# Altium schematic symbol library Thunderscope_Rev5.SCHLIB: 98 symbols
Pins are listed as number, name and electrical type; pins without a type are passive.

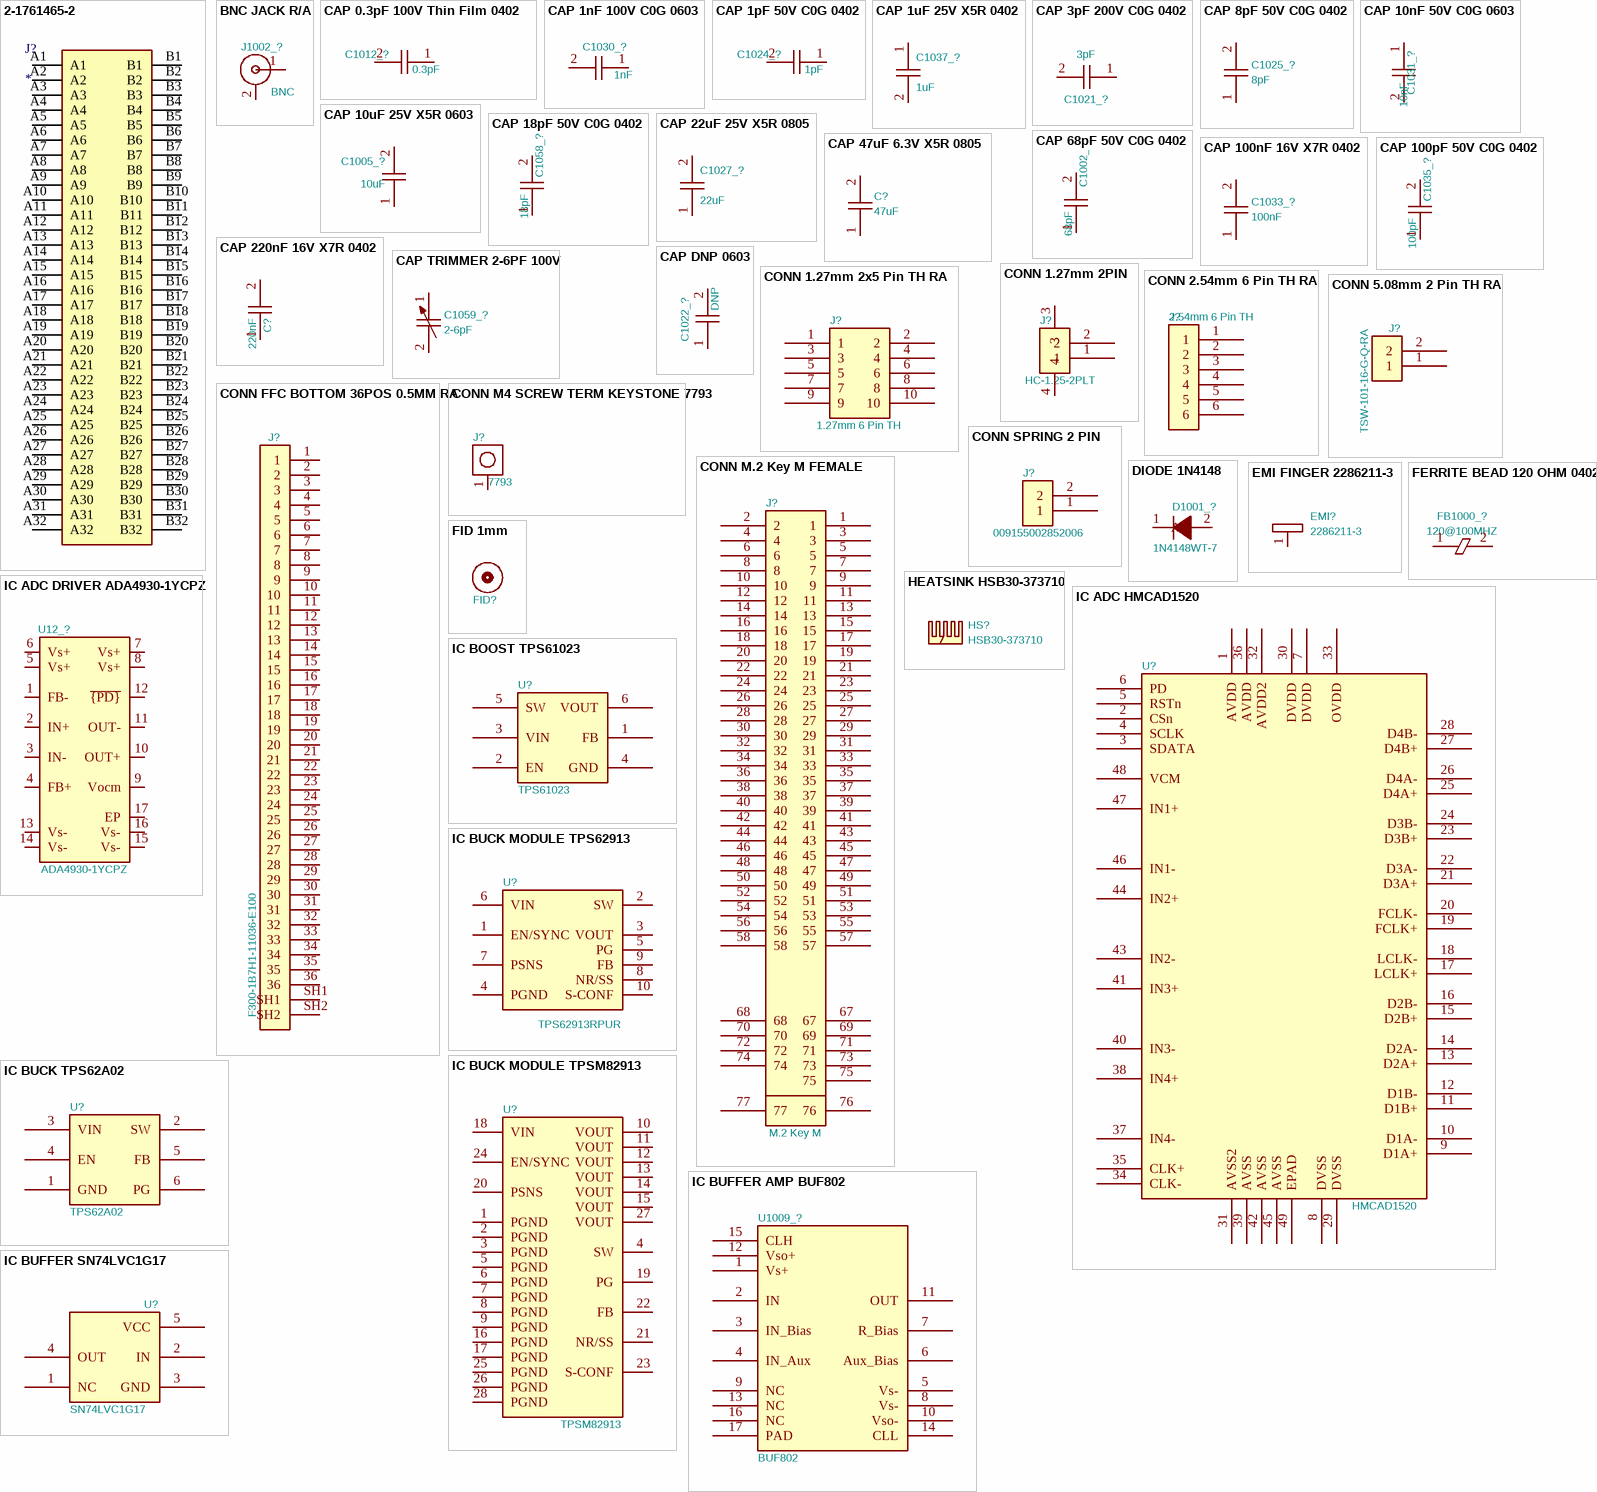
[diagram p0: symbols 2-1761465-2 to IC BUFFER SN74LVC1G17]

## 2-1761465-2
designator J?
Connector; Manufacturer_Name: TE Connectivity; Manufacturer_Part_Number: 2-1761465-2; Datasheet Link: https://www.mouser.com/datasheet/2/418/NG_CD_1761465_C-1243598.pdf; Height: 9.4mm; Mouser Part Number: 571-2-1761465-2; Mouser Price/Stock: https://www.mouser.co.uk/ProductDetail/TE-Connectivity/2-1761465-2?qs=sjGyaCEB9eZsZxkxHqzJRQ%3D%3D; Arrow Part Number: 2-1761465-2; Arrow Price/Stock: https://www.arrow.com/en/products/2-1761465-2/te-connectivity?region=nac
footprint 217614652
pins: A1, A2, A3, A4, A5, A6, A7, A8, A9, A10, A11, A12, A13, A14, A15, A16, A17, A18, A19, A20, A21, A22, A23, A24, A25, A26, A27, A28, A29, A30, A31, A32, B1, B2, B3, B4, B5, B6, B7, B8, B9, B10, B11, B12, B13, B14, B15, B16, B17, B18, B19, B20, B21, B22, B23, B24, B25, B26, B27, B28, B29, B30, B31, B32

## BNC JACK R/A
designator J1002_?, comment BNC
MANUFACTURER: Molex; MANUFACTURER PART NUMBER: 73100-0105; Substitutions Policy: No Substitutions; SUPPLIER 1: Mouser; SUPPLIER PART NUMBER 1: 538-73100-0105; PACKAGE: Through Hole; Footprint: Thunderscope_Rev5:MOL_0731000105; Value: BNC
footprint MOL_0731000105
pins: 1 Signal, 2 SHIELD

## CAP 0.3pF 100V Thin Film 0402
designator C1012_?, comment 0.3pF
MANUFACTURER: KYOCERA AVX; MANUFACTURER PART NUMBER: 04021J0R3ZBSTR; VOLTAGE RATING: 100V; Substitutions Policy: No Substitutions; PACKAGE: 0402; SUPPLIER 1: Mouser; SUPPLIER PART NUMBER 1: 581-04021J0R3ZBSTR; Footprint: Thunderscope_Rev5:GEN_C_0402; Value: 0.3pF
footprint GEN_C_0402
pins: 1, 2

## CAP 1nF 100V C0G 0603
designator C1030_?, comment 1nF
MANUFACTURER: Murata; MANUFACTURER PART NUMBER: GCM1885C2A102FA16D; VOLTAGE RATING: 100V; TEMPERATURE COEFFICIENT: C0G; Substitutions Policy: ECO Required for Substitution; PACKAGE: 0603; SUPPLIER 1: Mouser; SUPPLIER PART NUMBER 1: 81-GCM1885C2A102FA6D; Footprint: Thunderscope_Rev5:GEN_C_0603; Value: 1nF
footprint GEN_C_0603
pins: 1, 2

## CAP 1pF 50V C0G 0402
designator C1024_?, comment 1pF
MANUFACTURER: KEMET; MANUFACTURER PART NUMBER: CBR04C109A5GAC; VOLTAGE RATING: 50V; Substitutions Policy: No Substitutions; PACKAGE: 0402; SUPPLIER 1: Mouser; SUPPLIER PART NUMBER 1: 80-CBR04C109A5GAC; Footprint: Thunderscope_Rev5:GEN_C_0402; Value: 1pF
footprint GEN_C_0402
pins: 1, 2

## CAP 1uF 25V X5R 0402
designator C1037_?, comment 1uF
MANUFACTURER: Murata; MANUFACTURER PART NUMBER: GRM155R61E105KA12D; VOLTAGE RATING: 25V; Substitutions Policy: Any Parametric Equivalent; PACKAGE: 0402; SUPPLIER 1: Mouser; SUPPLIER PART NUMBER 1: 81-GRM155R61E105KA2D; Footprint: Thunderscope_Rev5:GEN_C_0402; Value: 1uF
footprint GEN_C_0402
pins: 1, 2

## CAP 3pF 200V C0G 0402
designator C1021_?, comment 3pF
MANUFACTURER: KEMET; MANUFACTURER PART NUMBER: CBR04C309B2GAC; VOLTAGE RATING: 200V; TEMPERATURE COEFFICIENT: C0G; Substitutions Policy: No Substitutions; PACKAGE: 0402; SUPPLIER 1: Mouser; SUPPLIER PART NUMBER 1: 80-CBR04C309B2GAC; Footprint: Thunderscope_Rev5:GEN_C_0402; Value: 3pF
footprint GEN_C_0402
pins: 1, 2

## CAP 8pF 50V C0G 0402
designator C1025_?, comment 8pF
MANUFACTURER: KEMET; MANUFACTURER PART NUMBER: CBR04C809B5GAC; VOLTAGE RATING: 50V; TEMPERATURE COEFFICIENT: C0G; Substitutions Policy: No Substitutions; PACKAGE: 0402; SUPPLIER 1: Mouser; SUPPLIER PART NUMBER 1: 80-CBR04C809B5GAC; Footprint: Thunderscope_Rev5:GEN_C_0402; Value: 8pF
footprint GEN_C_0402
pins: 1, 2

## CAP 10nF 50V C0G 0603
designator C1031_?, comment 10nF
MANUFACTURER: Murata; MANUFACTURER PART NUMBER: GRM1885C1H103JA01J; VOLTAGE RATING: 50V; Substitutions Policy: ECO Required for Substitution; PACKAGE: 0603; SUPPLIER 1: Mouser; SUPPLIER PART NUMBER 1: 81-GRM1885C1H103JA1J; Footprint: Thunderscope_Rev5:GEN_C_0603; Value: 10nF
footprint GEN_C_0603
pins: 1, 2

## CAP 10uF 25V X5R 0603
designator C1005_?, comment 10uF
MANUFACTURER: Murata; MANUFACTURER PART NUMBER: GRM188R61E106MA73D; VOLTAGE RATING: 25V; Substitutions Policy: Any Parametric Equivalent; PACKAGE: 0402; SUPPLIER 1: Mouser; SUPPLIER PART NUMBER 1: 81-GRM188R61E106MA3D; Footprint: Thunderscope_Rev5:GEN_C_0603; Value: 10uF
footprint GEN_C_0603
pins: 1, 2

## CAP 18pF 50V C0G 0402
designator C1058_?, comment 18pF
MANUFACTURER: KEMET; MANUFACTURER PART NUMBER: CBR04C180F5GAC; VOLTAGE RATING: 50V; TEMPERATURE COEFFICIENT: C0G; Substitutions Policy: No Substitutions; PACKAGE: 0402; SUPPLIER 1: Mouser; SUPPLIER PART NUMBER 1: 80-CBR04C180F5G; Footprint: Thunderscope_Rev5:GEN_C_0402; Value: 18pF
footprint GEN_C_0402
pins: 1, 2

## CAP 22uF 25V X5R 0805
designator C1027_?, comment 22uF
HOUSE PART NUMBER: C-22uF-0805-002; MANUFACTURER: Murata; MANUFACTURER PART NUMBER: GRM21BR61E226ME44L; VOLTAGE RATING: 25V; Substitutions Policy: Any Parametric Equivalent; PACKAGE: 0805; SUPPLIER 1: Mouser; SUPPLIER PART NUMBER 1: 81-GRM21BR61E226ME4L; Footprint: Thunderscope_Rev5:GEN_C_0805; Value: 22uF
footprint GEN_C_0805
pins: 1, 2

## CAP 47uF 6.3V X5R 0805
designator C?, comment 47uF
HOUSE PART NUMBER: C-47uF-0805-002; MANUFACTURER: Samsung; MANUFACTURER PART NUMBER: CL21A476MQYNNNE; VOLTAGE RATING: 6.3V; Substitutions Policy: Any Parametric Equivalent; PACKAGE: 0805; SUPPLIER 1: Mouser; SUPPLIER PART NUMBER 1: 187-CL32A226KPJNNNE; Footprint: Thunderscope_Rev5:GEN_C_0805; Value: 47uF
footprint GEN_C_0805
pins: 1, 2

## CAP 68pF 50V C0G 0402
designator C1002_?, comment 68pF
MANUFACTURER: Murata; MANUFACTURER PART NUMBER: GCM1555C1H680FA16J; TEMPERATURE COEFFICIENT: C0G; VOLTAGE RATING: 50V; Substitutions Policy: Any Parametric Equivalent; PACKAGE: 0402; SUPPLIER 1: Mouser; SUPPLIER PART NUMBER 1: 81-GCM1555C1H680FA6J; Footprint: Thunderscope_Rev5:GEN_C_0402; Value: 68pF
footprint GEN_C_0402
pins: 1, 2

## CAP 100nF 16V X7R 0402
designator C1033_?, comment 100nF
HOUSE PART NUMBER: C-100nF-0402-002; MANUFACTURER: Murata; MANUFACTURER PART NUMBER: GCM155R71C104KA55D; VOLTAGE RATING: 16V; Substitutions Policy: Any Parametric Equivalent; PACKAGE: 0402; SUPPLIER 1: Mouser; SUPPLIER PART NUMBER 1: 81-GCM155R71C104KA5D; Footprint: Thunderscope_Rev5:GEN_C_0402; Value: 100nF
footprint GEN_C_0402
pins: 1, 2

## CAP 100pF 50V C0G 0402
designator C1035_?, comment 100pF
MANUFACTURER: Murata; MANUFACTURER PART NUMBER: GCM1555C1H101FA16D; TEMPERATURE COEFFICIENT: C0G; VOLTAGE RATING: 50V; Substitutions Policy: Any Parametric Equivalent; PACKAGE: 0402; SUPPLIER 1: Mouser; SUPPLIER PART NUMBER 1: 81-GCM1555C1H101FA6D; Footprint: Thunderscope_Rev5:GEN_C_0402; Value: 100pF
footprint GEN_C_0402
pins: 1, 2

## CAP 220nF 16V X7R 0402
designator C?, comment 220nF
HOUSE PART NUMBER: C-100nF-0402-002; MANUFACTURER: Murata; MANUFACTURER PART NUMBER: GCM155R71C224KE02D; VOLTAGE RATING: 16V; Substitutions Policy: Any Parametric Equivalent; PACKAGE: 0402; SUPPLIER 1: Mouser; SUPPLIER PART NUMBER 1: 81-GCM155R71C224KE2D; Footprint: Thunderscope_Rev5:GEN_C_0402; Value: 220nF
footprint GEN_C_0402
pins: 1, 2

## CAP DNP 0603
designator C1022_?, comment DNP
PACKAGE: 0603; Footprint: Thunderscope_Rev5:GEN_C_0603; Value: DNP
footprint GEN_C_0603
pins: 1, 2

## CAP TRIMMER 2-6PF 100V
designator C1059_?, comment 2-6pF
MANUFACTURER: EW Electronics; MANUFACTURER PART NUMBER: SGC3S060; Substitutions Policy: ECO Required for Substitution; SUPPLIER 1: Digikey; SUPPLIER PART NUMBER 1: 2447-SGC3S060CT-ND; PACKAGE: 2-SMD (4.5x3.2mm); Footprint: Thunderscope_Rev5:EW_TRIMCAP; Value: 2-6pF
footprint EW_TRIMCAP
pins: 1, 2

## CONN 1.27mm 2PIN
designator J?, comment HC-1.25-2PLT
MANUFACTURER: KYOCERA AVX; MANUFACTURER PART NUMBER: 009155002852006; Substitutions Policy: No Substitutions; SUPPLIER 1: Mouser; SUPPLIER PART NUMBER 1: 581-009155002852006; PACKAGE: Surface Mount; Footprint: Thunderscope_Rev5:KYO_009155002852006; Value: HC-1.25-2PLT
footprint CONN-SMD_HC-1.25-2PLT
pins: 1, 2, 3, 4

## CONN 1.27mm 2x5 Pin TH RA
designator J?, comment 1.27mm 6 Pin TH
MANUFACTURER: CNC Tech; MANUFACTURER PART NUMBER: 3220-10-0200-00; Substitutions Policy: ECO Required for Substitution; SUPPLIER 1: Digi-Key; SUPPLIER PART NUMBER 1: 1175-1628-ND; PACKAGE: Through Hole; Footprint: Thunderscope_Rev5:GEN_1.27mm_2x5_Pin_TH_RA; Value: 1.27mm 6 Pin TH
footprint GEN_1.27mm_2x5_Pin_TH_RA
pins: 1, 2, 3, 4, 5, 6, 7, 8, 9, 10

## CONN 2.54mm 6 Pin TH RA
designator J?, comment 2.54mm 6 Pin TH
MANUFACTURER: Wurth Electronics; MANUFACTURER PART NUMBER: 61300611021; Substitutions Policy: ECO Required for Substitution; SUPPLIER 1: Mouser; SUPPLIER PART NUMBER 1: 710-61300611021; PACKAGE: Through Hole; Footprint: Thunderscope_Rev5:GEN_2.54MM_6_PIN_TH_RA; Value: 2.54mm 6 Pin TH
footprint GEN_2.54MM_6_PIN_TH_RA
pins: 1, 2, 3, 4, 5, 6

## CONN 5.08mm 2 Pin TH RA
designator J?, comment TSW-101-16-G-Q-RA
MANUFACTURER: Samtec; Substitutions Policy: ECO Required for Substitution; SUPPLIER 1: Mouser; SUPPLIER PART NUMBER 1: 200-TSW10116GQRA; MANUFACTURER PART NUMBER: TSW-101-16-G-Q-RA; PACKAGE: Through Hole; Footprint: Thunderscope_Rev5:GEN_5.08mm_1x2_Pin_TH_RA; Value: TSW-101-16-G-Q-RA
footprint GEN_5.08mm_1x2_Pin_TH_RA
pins: 1, 2

## CONN FFC BOTTOM 36POS 0.5MM RA
designator J?, comment F300-1B7H1-11036-E100
MANUFACTURER: Amphenol ICC; Substitutions Policy: No Substitutions; SUPPLIER 1: Mouser; SUPPLIER PART NUMBER 1: 649-F3001B7H111036E1; MANUFACTURER PART NUMBER: F300-1B7H1-11036-E100; PACKAGE: Surface Mount; Footprint: Thunderscope_Rev5:AMPHENOL_F300-1B7H1-11036-E100; Value: F300-1B7H1-11036-E100
footprint AMPHENOL_F300-1B7H1-11036-E100
pins: 1, 2, 3, 4, 5, 6, 7, 8, 9, 10, 11, 12, 13, 14, 15, 16, 17, 18, 19, 20, 21, 22, 23, 24, 25, 26, 27, 28, 29, 30, 31, 32, 33, 34, 35, 36, SH1, SH2

## CONN M4 SCREW TERM KEYSTONE 7793
designator J?, comment 7793
MANUFACTURER: Keystone Electronics; Substitutions Policy: No Substitutions; MANUFACTURER PART NUMBER: 7793; SUPPLIER 1: Mouser; SUPPLIER PART NUMBER 1: 534-7793; PACKAGE: Through Hole; Footprint: Thunderscope_Rev5:KEY_7792; Value: 7793
footprint KEY_7792
pins: 1

## CONN M.2 Key M FEMALE
designator J?, comment M.2 Key M
MANUFACTURER: TE Connectivity; MANUFACTURER PART NUMBER: 1-2199230-5; Substitutions Policy: No Substitutions; SUPPLIER 1: Mouser; SUPPLIER PART NUMBER 1: 571-1-2199230-5; PACKAGE: Surface Mount; Footprint: Thunderscope_Rev5:TE_M2_KEYM_2199230; Value: M.2 Key M
footprint TE_M2_KEYM_2199230
pins: 1, 2, 3, 4, 5, 6, 7, 8, 9, 10, 11, 12, 13, 14, 15, 16, 17, 18, 19, 20, 21, 22, 23, 24, 25, 26, 27, 28, 29, 30, 31, 32, 33, 34, 35, 36, 37, 38, 39, 40, 41, 42, 43, 44, 45, 46, 47, 48, 49, 50, 51, 52, 53, 54, 55, 56, 57, 58, 67, 68, 69, 70, 71, 72, 73, 74, 75, 76, 77

## CONN SPRING 2 PIN
designator J?, comment 009155002852006
MANUFACTURER: KYOCERA AVX; Substitutions Policy: No Substitutions; SUPPLIER 1: Mouser; SUPPLIER PART NUMBER 1: 581-009155002852006; MANUFACTURER PART NUMBER: 009155002852006; PACKAGE: Surface Mount; Footprint: Thunderscope_Rev5:KYO_009155002852006; Value: 009155002852006
footprint KYO_009155002852006
pins: 1, 2

## DIODE 1N4148
designator D1001_?, comment 1N4148WT-7
MANUFACTURER: Diodes; Substitutions Policy: ECO Required for Substitution; SUPPLIER 1: Mouser; SUPPLIER PART NUMBER 1: 621-1N4148WT; MANUFACTURER PART NUMBER: 1N4148WT-7; PACKAGE: SOD-523; Footprint: Thunderscope_Rev5:GEN_SOD_523; Value: 1N4148WT-7
footprint GEN_SOD_523
pins: 1 K, 2 A

## EMI FINGER 2286211-3
designator EMI?, comment 2286211-3
MANUFACTURER: TE Connectivity; Substitutions Policy: No Substitutions; SUPPLIER 1: Mouser; SUPPLIER PART NUMBER 1: 571-2286211-3; MANUFACTURER PART NUMBER: 2286211-3; PACKAGE: Surface Mount; Footprint: Thunderscope_Rev5:TE_2286211-3; Value: 2286211-3
footprint TE_2286211-3
pins: 1

## FERRITE BEAD 120 OHM 0402
designator FB1000_?, comment 120@100MHZ
HOUSE PART NUMBER: BLM15PX121SN1D; MANUFACTURER: Murata; Substitutions Policy: No Substitutions; SUPPLIER 1: Mouser; SUPPLIER PART NUMBER 1: 81-BLM15PX121SN1D; MANUFACTURER PART NUMBER: BLM15PX121SN1D; PACKAGE: 0402; Footprint: Thunderscope_Rev5:GEN_R_0402; Value: 120@100MHZ
footprint GEN_R_0402
pins: 1, 2

## FID 1mm
designator FID?, comment PCB  (value not drawn)
HOUSE PART NUMBER: Fiducial-1; Footprint: Thunderscope_Rev5:GEN_FID; Value: PCB
footprint GEN_FID

## HEATSINK HSB30-373710
designator HS?, comment HSB30-373710
MANUFACTURER: Same Sky; SUPPLIER 1: Mouser; SUPPLIER PART NUMBER 1: 179-HSB30-373710; MANUFACTURER PART NUMBER: HSB30-373710; Footprint: Thunderscope_Rev5:SSKY_HSB30-373710; Value: HSB30-373710
footprint SSKY_HSB30-373710

## IC ADC DRIVER ADA4930-1YCPZ
designator U12_?, comment ADA4930-1YCPZ
MANUFACTURER: Analog Devices; MANUFACTURER PART NUMBER: ADA4930-1YCPZ-R7; Substitutions Policy: No Substitutions; SUPPLIER 1: Mouser; SUPPLIER PART NUMBER 1: 584-ADA4930-1YCPZ-R7; PACKAGE: 16-QFN (3x3mm); Footprint: Thunderscope_Rev5:AD_QFN16_CP-16-21; Value: ADA4930-1YCPZ
footprint AD_QFN16_CP-16-21
pins: 1 FB-, 2 IN+, 3 IN-, 4 FB+, 5 Vs+, 6 Vs+, 7 Vs+, 8 Vs+, 9 Vocm, 10 OUT+, 11 OUT-, 12 ~{{PD}}, 13 Vs-, 14 Vs-, 15 Vs-, 16 Vs-, 17 EP

## IC ADC HMCAD1520
designator U?, comment HMCAD1520
MANUFACTURER: Analog Devices; Substitutions Policy: No Substitutions; SUPPLIER 1: Mouser; SUPPLIER PART NUMBER 1: 584-HMCAD1520; MANUFACTURER PART NUMBER: HMCAD1520; PACKAGE: 48-QFN (7x7mm); Footprint: Thunderscope_Rev5:AD_QFN48_LP7; Value: HMCAD1520
footprint AD_QFN48_LP7
pins: 1 AVDD, 2 CSn, 3 SDATA, 4 SCLK, 5 RSTn, 6 PD, 7 DVDD, 8 DVSS, 9 D1A+, 10 D1A-, 11 D1B+, 12 D1B-, 13 D2A+, 14 D2A-, 15 D2B+, 16 D2B-, 17 LCLK+, 18 LCLK-, 19 FCLK+, 20 FCLK-, 21 D3A+, 22 D3A-, 23 D3B+, 24 D3B-, 25 D4A+, 26 D4A-, 27 D4B+, 28 D4B-, 29 DVSS, 30 DVDD, 31 AVSS2, 32 AVDD2, 33 OVDD, 34 CLK-, 35 CLK+, 36 AVDD, 37 IN4-, 38 IN4+, 39 AVSS, 40 IN3-, 41 IN3+, 42 AVSS, 43 IN2-, 44 IN2+, 45 AVSS, 46 IN1-, 47 IN1+, 48 VCM, 49 EPAD

## IC BOOST TPS61023
designator U?, comment TPS61023
MANUFACTURER: Texas Instruments; MANUFACTURER PART NUMBER: TPS61023DRLT; Substitutions Policy: No Substitutions; SUPPLIER 1: Texas Instruments; SUPPLIER PART NUMBER 1: TPS61023DRLT; PACKAGE: SOT-563; Footprint: Thunderscope_Rev5:TI_SOT563_DRL0006A; Value: TPS61023
footprint TI_SOT563_DRL0006A
pins: 1 FB, 2 EN, 3 VIN, 4 GND, 5 SW, 6 VOUT

## IC BUCK MODULE TPS62913
designator U?, comment value TPS62913RPUR  (hidden comment: TPS62913)
MANUFACTURER: Texas Instruments; MANUFACTURER PART NUMBER: TPSM82913RDUR; Substitutions Policy: No Substitutions; SUPPLIER 1: Texas Instruments; SUPPLIER PART NUMBER 1: TPSM82913RDUR; PACKAGE: 28-B0QFN (4.5x5.5mm); Footprint: Thunderscope_Rev5:TI_B0QFN_RDU0028A
footprint TPS62913RPUR
pins: 1 EN/SYNC, 2 SW, 3 VOUT, 4 PGND, 5 PG, 6 VIN, 7 PSNS, 8 NR/SS, 9 FB, 10 S-CONF

## IC BUCK MODULE TPSM82913
designator U?, comment TPSM82913
MANUFACTURER: Texas Instruments; MANUFACTURER PART NUMBER: TPSM82913RDUR; Substitutions Policy: No Substitutions; SUPPLIER 1: Texas Instruments; SUPPLIER PART NUMBER 1: TPSM82913RDUR; PACKAGE: 28-B0QFN (4.5x5.5mm); Footprint: Thunderscope_Rev5:TI_B0QFN_RDU0028A; Value: TPSM82913
footprint TI_B0QFN_RDU0028A
pins: 1 PGND, 2 PGND, 3 PGND, 4 SW, 5 PGND, 6 PGND, 7 PGND, 8 PGND, 9 PGND, 10 VOUT, 11 VOUT, 12 VOUT, 13 VOUT, 14 VOUT, 15 VOUT, 16 PGND, 17 PGND, 18 VIN, 19 PG, 20 PSNS, 21 NR/SS, 22 FB, 23 S-CONF, 24 EN/SYNC, 25 PGND, 26 PGND, 27 VOUT, 28 PGND

## IC BUCK TPS62A02
designator U?, comment TPS62A02
HOUSE PART NUMBER: TPS62A02DRLR; MANUFACTURER: Texas Instruments; Substitutions Policy: No Substitutions; SUPPLIER 1: Texas Instruments; SUPPLIER PART NUMBER 1: TPS62A02DRLR; MANUFACTURER PART NUMBER: TPS62A02DRLR; PACKAGE: SOT-563; Footprint: Thunderscope_Rev5:TI_SOT563_DRL0006A; Value: TPS62A02
footprint TI_SOT563_DRL0006A
pins: 1 GND, 2 SW, 3 VIN, 4 EN, 5 FB, 6 PG

## IC BUFFER AMP BUF802
designator U1009_?, comment BUF802
MANUFACTURER: Texas Instruments; MANUFACTURER PART NUMBER: BUF802IRGTR; Substitutions Policy: No Substitutions; SUPPLIER 1: Texas Instruments; SUPPLIER PART NUMBER 1: BUF802IRGTR; PACKAGE: 16-VQFN (3x3mm); Footprint: Thunderscope_Rev5:TI_VQFN_RGT0016C; Value: BUF802
footprint TI_VQFN_RGT0016C
pins: 1 Vs+, 2 IN, 3 IN_Bias, 4 IN_Aux, 5 Vs-, 6 Aux_Bias, 7 R_Bias, 8 Vs-, 9 NC, 10 Vso-, 11 OUT, 12 Vso+, 13 NC, 14 CLL, 15 CLH, 16 NC, 17 PAD

## IC BUFFER SN74LVC1G17
designator U?, comment SN74LVC1G17
MANUFACTURER: Texas Instruments; MANUFACTURER PART NUMBER: SN74LVC1G17DCKR; Substitutions Policy: ECO Required for Substitution; SUPPLIER 1: Texas Instruments; SUPPLIER PART NUMBER 1: SN74LVC1G17DCKR; PACKAGE: SC-70-5; Footprint: Thunderscope_Rev5:GEN_SC-70-5; Value: SN74LVC1G17
footprint GEN_SC-70-5
pins: 1 NC, 2 IN, 3 GND, 4 OUT, 5 VCC

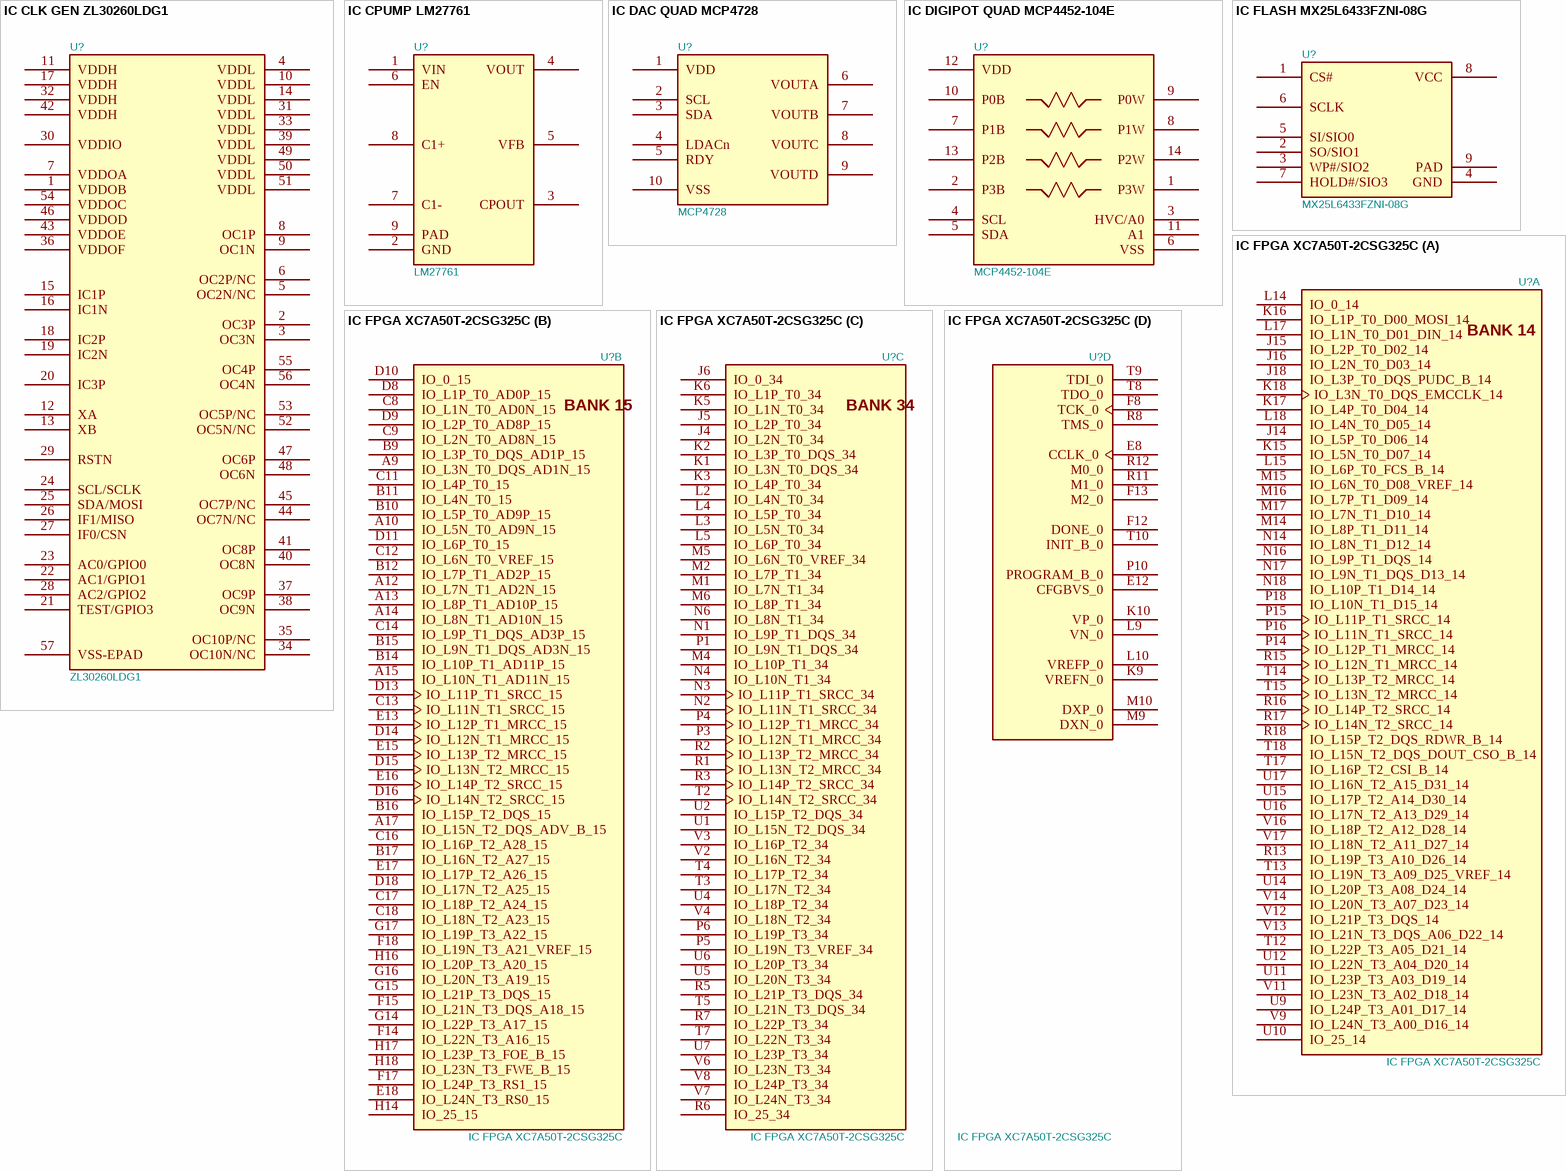
[diagram p1: symbols IC CLK GEN ZL30260LDG1 to IC FPGA XC7A50T-2CSG325C]

## IC CLK GEN ZL30260LDG1
designator U?, comment ZL30260LDG1
MANUFACTURER: Microchip; Substitutions Policy: No Substitutions; MANUFACTURER PART NUMBER: ZL30260LDG1; SUPPLIER 1: Mouser; SUPPLIER PART NUMBER 1: 494-ZL30260LDG1; PACKAGE: 56-VFQFN (8x8mm); Footprint: Thunderscope_Rev5:MC_QFN56_ZL30260; Value: ZL30260LDG1
footprint MC_QFN56_ZL30260
pins: 1 VDDOB, 2 OC3P, 3 OC3N, 4 VDDL, 5 OC2N/NC, 6 OC2P/NC, 7 VDDOA, 8 OC1P, 9 OC1N, 10 VDDL, 11 VDDH, 12 XA, 13 XB, 14 VDDL, 15 IC1P, 16 IC1N, 17 VDDH, 18 IC2P, 19 IC2N, 20 IC3P, 21 TEST/GPIO3, 22 AC1/GPIO1, 23 AC0/GPIO0, 24 SCL/SCLK, 25 SDA/MOSI, 26 IF1/MISO, 27 IF0/CSN, 28 AC2/GPIO2, 29 RSTN, 30 VDDIO, 31 VDDL, 32 VDDH, 33 VDDL, 34 OC10N/NC, 35 OC10P/NC, 36 VDDOF, 37 OC9P, 38 OC9N, 39 VDDL, 40 OC8N, 41 OC8P, 42 VDDH, 43 VDDOE, 44 OC7N/NC, 45 OC7P/NC, 46 VDDOD, 47 OC6P, 48 OC6N, 49 VDDL, 50 VDDL, 51 VDDL, 52 OC5N/NC, 53 OC5P/NC, 54 VDDOC, 55 OC4P, 56 OC4N, 57 VSS-EPAD

## IC CPUMP LM27761
designator U?, comment LM27761
MANUFACTURER: Texas Instruments; MANUFACTURER PART NUMBER: LM27761DSGR; Substitutions Policy: No Substitutions; SUPPLIER 1: Texas Instruments; SUPPLIER PART NUMBER 1: LM27761DSGR; PACKAGE: 8-WFDFN (2x2mm); Footprint: Thunderscope_Rev5:TI_WSON8_DSG0008A; Value: LM27761
footprint TI_WSON8_DSG0008A
pins: 1 VIN, 2 GND, 3 CPOUT, 4 VOUT, 5 VFB, 6 EN, 7 C1-, 8 C1+, 9 PAD

## IC DAC QUAD MCP4728
designator U?, comment MCP4728
MANUFACTURER: Microchip; MANUFACTURER PART NUMBER: MCP4728T-E/UN; Substitutions Policy: ECO Required for Substitution; SUPPLIER 1: Mouser; SUPPLIER PART NUMBER 1: 579-MCP4728T-E/UN; PACKAGE: 10-MSOP; Footprint: Thunderscope_Rev5:MC_MSOP10_UN; Value: MCP4728
footprint MC_MSOP10_UN
pins: 1 VDD, 2 SCL, 3 SDA, 4 LDACn, 5 RDY, 6 VOUTA, 7 VOUTB, 8 VOUTC, 9 VOUTD, 10 VSS

## IC DIGIPOT QUAD MCP4452-104E
designator U?, comment MCP4452-104E
MANUFACTURER: Microchip; Substitutions Policy: ECO Required for Substitution; SUPPLIER 1: Mouser; SUPPLIER PART NUMBER 1: 579-MCP4452-104E/ST; MANUFACTURER PART NUMBER: MCP4452-104E; PACKAGE: 14-TSSOP; Footprint: Thunderscope_Rev5:MC_TSSOP14; Value: MCP4452-104E
footprint MC_TSSOP14
pins: 1 P3W, 2 P3B, 3 HVC/A0, 4 SCL, 5 SDA, 6 VSS, 7 P1B, 8 P1W, 9 P0W, 10 P0B, 11 A1, 12 VDD, 13 P2B, 14 P2W

## IC FLASH MX25L6433FZNI-08G
designator U?, comment MX25L6433FZNI-08G
HOUSE PART NUMBER: MX25L6433FZNI-08G-TR; MANUFACTURER: Macronix; Substitutions Policy: ECO Required for Substitution; SUPPLIER 1: Mouser; SUPPLIER PART NUMBER 1: 95-25L6433FZNI08TR; MANUFACTURER PART NUMBER: MX25L6433FZNI-08G-TR; PACKAGE: 8-WSON (6x5mm); Footprint: Thunderscope_Rev5:MX_WSON8; Value: MX25L6433FZNI-08G
footprint MX_WSON8
pins: 1 CS#, 2 SO/SIO1, 3 WP#/SIO2, 4 GND, 5 SI/SIO0, 6 SCLK, 7 HOLD#/SIO3, 8 VCC, 9 PAD

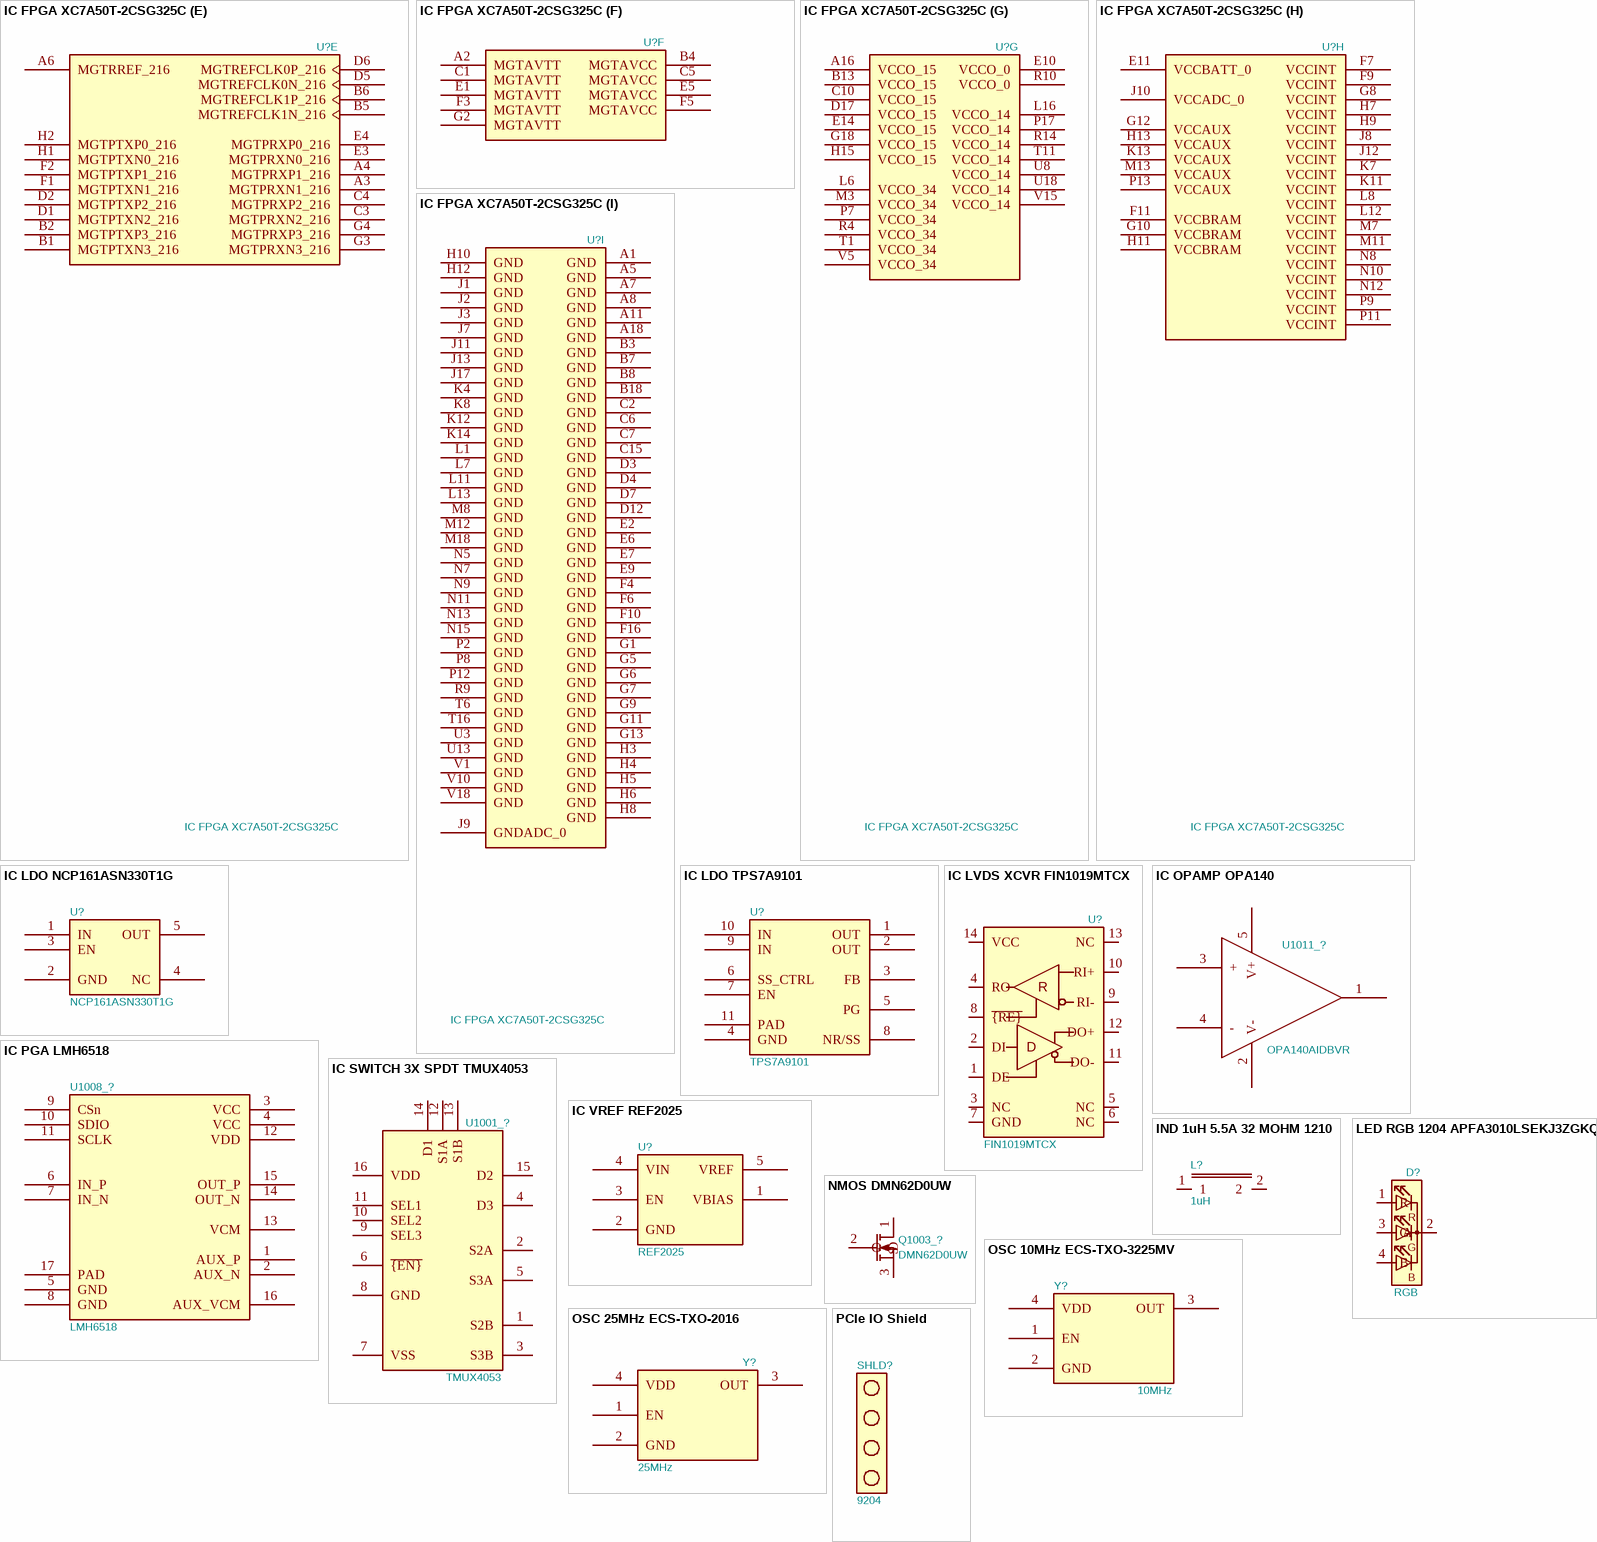
[diagram p2: symbols IC FPGA XC7A50T-2CSG325C to PCIe IO Shield]

## IC FPGA XC7A50T-2CSG325C
designator U?
MANUFACTURER: Xilinx; Substitutions Policy: No Substitutions; HOUSE PART NUMBER: XC7A50T-2CSG325C; MANUFACTURER PART NUMBER: XC7A50T-2CSG325C; SUPPLIER 1: Digi-Key; SUPPLIER PART NUMBER 1: 122-2193-ND; PACKAGE: 324-BGA (15x15mm); Footprint: Thunderscope_Rev5:XILINX_XC7A50T-2CSG325C; Value: IC FPGA XC7A50T-2CSG325C
footprint XILINX_XC7A50T-2CSG325C
part A pins: J14 IO_L5P_T0_D06_14, J15 IO_L2P_T0_D02_14, J16 IO_L2N_T0_D03_14, J18 IO_L3P_T0_DQS_PUDC_B_14, K15 IO_L5N_T0_D07_14, K16 IO_L1P_T0_D00_MOSI_14, K17 IO_L4P_T0_D04_14, K18 IO_L3N_T0_DQS_EMCCLK_14, L14 IO_0_14, L15 IO_L6P_T0_FCS_B_14, L17 IO_L1N_T0_D01_DIN_14, L18 IO_L4N_T0_D05_14, M14 IO_L8P_T1_D11_14, M15 IO_L6N_T0_D08_VREF_14, M16 IO_L7P_T1_D09_14, M17 IO_L7N_T1_D10_14, N14 IO_L8N_T1_D12_14, N16 IO_L9P_T1_DQS_14, N17 IO_L9N_T1_DQS_D13_14, N18 IO_L10P_T1_D14_14, P14 IO_L12P_T1_MRCC_14, P15 IO_L11P_T1_SRCC_14, P16 IO_L11N_T1_SRCC_14, P18 IO_L10N_T1_D15_14, R13 IO_L19P_T3_A10_D26_14, R15 IO_L12N_T1_MRCC_14, R16 IO_L14P_T2_SRCC_14, R17 IO_L14N_T2_SRCC_14, R18 IO_L15P_T2_DQS_RDWR_B_14, T12 IO_L22P_T3_A05_D21_14, T13 IO_L19N_T3_A09_D25_VREF_14, T14 IO_L13P_T2_MRCC_14, T15 IO_L13N_T2_MRCC_14, T17 IO_L16P_T2_CSI_B_14, T18 IO_L15N_T2_DQS_DOUT_CSO_B_14, U9 IO_L24P_T3_A01_D17_14, U10 IO_25_14, U11 IO_L23P_T3_A03_D19_14, U12 IO_L22N_T3_A04_D20_14, U14 IO_L20P_T3_A08_D24_14, U15 IO_L17P_T2_A14_D30_14, U16 IO_L17N_T2_A13_D29_14, U17 IO_L16N_T2_A15_D31_14, V9 IO_L24N_T3_A00_D16_14, V11 IO_L23N_T3_A02_D18_14, V12 IO_L21P_T3_DQS_14, V13 IO_L21N_T3_DQS_A06_D22_14, V14 IO_L20N_T3_A07_D23_14, V16 IO_L18P_T2_A12_D28_14, V17 IO_L18N_T2_A11_D27_14
part B pins: A9 IO_L3N_T0_DQS_AD1N_15, A10 IO_L5N_T0_AD9N_15, A12 IO_L7N_T1_AD2N_15, A13 IO_L8P_T1_AD10P_15, A14 IO_L8N_T1_AD10N_15, A15 IO_L10N_T1_AD11N_15, A17 IO_L15N_T2_DQS_ADV_B_15, B9 IO_L3P_T0_DQS_AD1P_15, B10 IO_L5P_T0_AD9P_15, B11 IO_L4N_T0_15, B12 IO_L7P_T1_AD2P_15, B14 IO_L10P_T1_AD11P_15, B15 IO_L9N_T1_DQS_AD3N_15, B16 IO_L15P_T2_DQS_15, B17 IO_L16N_T2_A27_15, C8 IO_L1N_T0_AD0N_15, C9 IO_L2N_T0_AD8N_15, C11 IO_L4P_T0_15, C12 IO_L6N_T0_VREF_15, C13 IO_L11N_T1_SRCC_15, C14 IO_L9P_T1_DQS_AD3P_15, C16 IO_L16P_T2_A28_15, C17 IO_L18P_T2_A24_15, C18 IO_L18N_T2_A23_15, D8 IO_L1P_T0_AD0P_15, D9 IO_L2P_T0_AD8P_15, D10 IO_0_15, D11 IO_L6P_T0_15, D13 IO_L11P_T1_SRCC_15, D14 IO_L12N_T1_MRCC_15, D15 IO_L13N_T2_MRCC_15, D16 IO_L14N_T2_SRCC_15, D18 IO_L17N_T2_A25_15, E13 IO_L12P_T1_MRCC_15, E15 IO_L13P_T2_MRCC_15, E16 IO_L14P_T2_SRCC_15, E17 IO_L17P_T2_A26_15, E18 IO_L24N_T3_RS0_15, F14 IO_L22N_T3_A16_15, F15 IO_L21N_T3_DQS_A18_15, F17 IO_L24P_T3_RS1_15, F18 IO_L19N_T3_A21_VREF_15, G14 IO_L22P_T3_A17_15, G15 IO_L21P_T3_DQS_15, G16 IO_L20N_T3_A19_15, G17 IO_L19P_T3_A22_15, H14 IO_25_15, H16 IO_L20P_T3_A20_15, H17 IO_L23P_T3_FOE_B_15, H18 IO_L23N_T3_FWE_B_15
part C pins: J4 IO_L2N_T0_34, J5 IO_L2P_T0_34, J6 IO_0_34, K1 IO_L3N_T0_DQS_34, K2 IO_L3P_T0_DQS_34, K3 IO_L4P_T0_34, K5 IO_L1N_T0_34, K6 IO_L1P_T0_34, L2 IO_L4N_T0_34, L3 IO_L5N_T0_34, L4 IO_L5P_T0_34, L5 IO_L6P_T0_34, M1 IO_L7N_T1_34, M2 IO_L7P_T1_34, M4 IO_L10P_T1_34, M5 IO_L6N_T0_VREF_34, M6 IO_L8P_T1_34, N1 IO_L9P_T1_DQS_34, N2 IO_L11N_T1_SRCC_34, N3 IO_L11P_T1_SRCC_34, N4 IO_L10N_T1_34, N6 IO_L8N_T1_34, P1 IO_L9N_T1_DQS_34, P3 IO_L12N_T1_MRCC_34, P4 IO_L12P_T1_MRCC_34, P5 IO_L19N_T3_VREF_34, P6 IO_L19P_T3_34, R1 IO_L13N_T2_MRCC_34, R2 IO_L13P_T2_MRCC_34, R3 IO_L14P_T2_SRCC_34, R5 IO_L21P_T3_DQS_34, R6 IO_25_34, R7 IO_L22P_T3_34, T2 IO_L14N_T2_SRCC_34, T3 IO_L17N_T2_34, T4 IO_L17P_T2_34, T5 IO_L21N_T3_DQS_34, T7 IO_L22N_T3_34, U1 IO_L15N_T2_DQS_34, U2 IO_L15P_T2_DQS_34, U4 IO_L18P_T2_34, U5 IO_L20N_T3_34, U6 IO_L20P_T3_34, U7 IO_L23P_T3_34, V2 IO_L16N_T2_34, V3 IO_L16P_T2_34, V4 IO_L18N_T2_34, V6 IO_L23N_T3_34, V7 IO_L24N_T3_34, V8 IO_L24P_T3_34
part D pins: E8 CCLK_0, E12 CFGBVS_0, F8 TCK_0, F12 DONE_0, F13 M2_0, K9 VREFN_0, K10 VP_0, L9 VN_0, L10 VREFP_0, M9 DXN_0, M10 DXP_0, P10 PROGRAM_B_0, R8 TMS_0, R11 M1_0, R12 M0_0, T8 TDO_0, T9 TDI_0, T10 INIT_B_0
part E pins: A3 MGTPRXN1_216, A4 MGTPRXP1_216, A6 MGTRREF_216, B1 MGTPTXN3_216, B2 MGTPTXP3_216, B5 MGTREFCLK1N_216, B6 MGTREFCLK1P_216, C3 MGTPRXN2_216, C4 MGTPRXP2_216, D1 MGTPTXN2_216, D2 MGTPTXP2_216, D5 MGTREFCLK0N_216, D6 MGTREFCLK0P_216, E3 MGTPRXN0_216, E4 MGTPRXP0_216, F1 MGTPTXN1_216, F2 MGTPTXP1_216, G3 MGTPRXN3_216, G4 MGTPRXP3_216, H1 MGTPTXN0_216, H2 MGTPTXP0_216
part F pins: A2 MGTAVTT, B4 MGTAVCC, C1 MGTAVTT, C5 MGTAVCC, E1 MGTAVTT, E5 MGTAVCC, F3 MGTAVTT, F5 MGTAVCC, G2 MGTAVTT
part G pins: A16 VCCO_15, B13 VCCO_15, C10 VCCO_15, D17 VCCO_15, E10 VCCO_0, E14 VCCO_15, G18 VCCO_15, H15 VCCO_15, L6 VCCO_34, L16 VCCO_14, M3 VCCO_34, P7 VCCO_34, P17 VCCO_14, R4 VCCO_34, R10 VCCO_0, R14 VCCO_14, T1 VCCO_34, T11 VCCO_14, U8 VCCO_14, U18 VCCO_14, V5 VCCO_34, V15 VCCO_14
part H pins: E11 VCCBATT_0, F7 VCCINT, F9 VCCINT, F11 VCCBRAM, G8 VCCINT, G10 VCCBRAM, G12 VCCAUX, H7 VCCINT, H9 VCCINT, H11 VCCBRAM, H13 VCCAUX, J8 VCCINT, J10 VCCADC_0, J12 VCCINT, K7 VCCINT, K11 VCCINT, K13 VCCAUX, L8 VCCINT, L12 VCCINT, M7 VCCINT, M11 VCCINT, M13 VCCAUX, N8 VCCINT, N10 VCCINT, N12 VCCINT, P9 VCCINT, P11 VCCINT, P13 VCCAUX
part I pins: A1 GND, A5 GND, A7 GND, A8 GND, A11 GND, A18 GND, B3 GND, B7 GND, B8 GND, B18 GND, C2 GND, C6 GND, C7 GND, C15 GND, D3 GND, D4 GND, D7 GND, D12 GND, E2 GND, E6 GND, E7 GND, E9 GND, F4 GND, F6 GND, F10 GND, F16 GND, G1 GND, G5 GND, G6 GND, G7 GND, G9 GND, G11 GND, G13 GND, H3 GND, H4 GND, H5 GND, H6 GND, H8 GND, H10 GND, H12 GND, J1 GND, J2 GND, J3 GND, J7 GND, J9 GNDADC_0, J11 GND, J13 GND, J17 GND, K4 GND, K8 GND, K12 GND, K14 GND, L1 GND, L7 GND, L11 GND, L13 GND, M8 GND, M12 GND, M18 GND, N5 GND, N7 GND, N9 GND, N11 GND, N13 GND, N15 GND, P2 GND, P8 GND, P12 GND, R9 GND, T6 GND, T16 GND, U3 GND, U13 GND, V1 GND, V10 GND, V18 GND
part A text: BANK 14
part B text: BANK 15
part C text: BANK 34

## IC LDO NCP161ASN330T1G
designator U?, comment NCP161ASN330T1G
MANUFACTURER: onsemi; Substitutions Policy: No Substitutions; MANUFACTURER PART NUMBER: NCP161ASN330T1G; SUPPLIER 1: Mouser; SUPPLIER PART NUMBER 1: 863-NCP161ASN330T1G; PACKAGE: SOT-23-5; Footprint: Thunderscope_Rev5:GEN_SOT23_5_950_2900X1600X1450; Value: NCP161ASN330T1G
footprint GEN_SOT23_5_950_2900X1600X1450
pins: 1 IN, 2 GND, 3 EN, 4 NC, 5 OUT

## IC LDO TPS7A9101
designator U?, comment TPS7A9101
MANUFACTURER: Texas Instruments; MANUFACTURER PART NUMBER: TPS7A9101DSKR; Substitutions Policy: No Substitutions; SUPPLIER 1: Texas Instruments; SUPPLIER PART NUMBER 1: TPS7A9101DSKR; PACKAGE: 10-DFN (2.5x2.5mm); Footprint: Thunderscope_Rev5:TI_WSON10_DSK0010A; Value: TPS7A9101
footprint TI_WSON10_DSK0010A
pins: 1 OUT, 2 OUT, 3 FB, 4 GND, 5 PG, 6 SS_CTRL, 7 EN, 8 NR/SS, 9 IN, 10 IN, 11 PAD

## IC LVDS XCVR FIN1019MTCX
designator U?, comment FIN1019MTCX
MANUFACTURER: onsemi; Substitutions Policy: No Substitutions; SUPPLIER 1: Mouser; SUPPLIER PART NUMBER 1: 512-FIN1019MTCX; MANUFACTURER PART NUMBER: FIN1019MTCX; PACKAGE: 14-TSSOP; Footprint: Thunderscope_Rev5:GEN_TSSOP-14_4.4x5mm_P0.65mm; Value: FIN1019MTCX
footprint GEN_TSSOP-14_4.4x5mm_P0.65mm
pins: 1 DE, 2 DI, 3 NC, 4 RO, 5 NC, 6 NC, 7 GND, 8 ~{{RE}}, 9 RI-, 10 RI+, 11 DO-, 12 DO+, 13 NC, 14 VCC
text: R; D

## IC OPAMP OPA140
designator U1011_?, comment OPA140AIDBVR
MANUFACTURER: Texas Instruments; Substitutions Policy: No Substitutions; SUPPLIER 1: Texas Instruments; SUPPLIER PART NUMBER 1: OPA140AIDBVR; MANUFACTURER PART NUMBER: OPA140AIDBVR; PACKAGE: SOT-23-5; Footprint: Thunderscope_Rev5:GEN_SOT23_5_950_2900X1600X1450; Value: OPA140AIDBVR
footprint GEN_SOT23_5_950_2900X1600X1450
pins: 1 OUT, 2 V-, 3 +, 4 -, 5 V+

## IC PGA LMH6518
designator U1008_?, comment LMH6518
MANUFACTURER: Texas Instruments; MANUFACTURER PART NUMBER: LMH6518SQX/NOPB; Substitutions Policy: No Substitutions; SUPPLIER 1: Texas Instruments; SUPPLIER PART NUMBER 1: LMH6518SQX/NOPB; PACKAGE: 16-WQFN (4x4mm); Footprint: Thunderscope_Rev5:TI_WQFN_RGH0016A; Value: LMH6518
footprint TI_WQFN_RGH0016A
pins: 1 AUX_P, 2 AUX_N, 3 VCC, 4 VCC, 5 GND, 6 IN_P, 7 IN_N, 8 GND, 9 CSn, 10 SDIO, 11 SCLK, 12 VDD, 13 VCM, 14 OUT_N, 15 OUT_P, 16 AUX_VCM, 17 PAD

## IC SWITCH 3X SPDT TMUX4053
designator U1001_?, comment TMUX4053
MANUFACTURER: Texas Instruments; MANUFACTURER PART NUMBER: TMUX4053DYYR; Substitutions Policy: No Substitutions; SUPPLIER 1: Texas Instruments; SUPPLIER PART NUMBER 1: TMUX4053DYYR; PACKAGE: 16-SOT-23-THIN; Footprint: Thunderscope_Rev5:TI_TSOT-23-16_DYY0016A; Value: TMUX4053
footprint TI_TSOT-23-16_DYY0016A
pins: 1 S2B, 2 S2A, 3 S3B, 4 D3, 5 S3A, 6 ~{{EN}}, 7 VSS, 8 GND, 9 SEL3, 10 SEL2, 11 SEL1, 12 S1A, 13 S1B, 14 D1, 15 D2, 16 VDD

## IC VREF REF2025
designator U?, comment REF2025
MANUFACTURER: Texas Instruments; MANUFACTURER PART NUMBER: REF2025AIDDCR; Substitutions Policy: No Substitutions; SUPPLIER 1: Texas Instruments; SUPPLIER PART NUMBER 1: REF2025AIDDCR; PACKAGE: SOT-23-5; Footprint: Thunderscope_Rev5:GEN_SOT23_5_950_2900X1600X1450; Value: REF2025
footprint GEN_SOT23_5_950_2900X1600X1450
pins: 1 VBIAS, 2 GND, 3 EN, 4 VIN, 5 VREF

## IND 1uH 5.5A 32 MOHM 1210
designator L?, comment 1uH
HOUSE PART NUMBER: SRP3212-1R0M; MANUFACTURER: Bourns; Substitutions Policy: ECO Required for Substitution; SUPPLIER 1: Mouser; SUPPLIER PART NUMBER 1: 652-SRP3212-1R0M; MANUFACTURER PART NUMBER: SRP3212-1R0M; PACKAGE: 1210; Footprint: Thunderscope_Rev5:GEN_L_1210; Value: 1uH
footprint GEN_L_1210
pins: 1, 2

## LED RGB 1204 APFA3010LSEKJ3ZGKQBC
designator D?, comment RGB
MANUFACTURER: Kingbright; MANUFACTURER PART NUMBER: APFA3010LSEKJ3ZGKQBC; Substitutions Policy: ECO Required for Substitution; SUPPLIER 1: Mouser; SUPPLIER PART NUMBER 1: 604-APFA3010LSEKJ3ZG; PACKAGE: 4-SMD; Footprint: Thunderscope_Rev5:LED_Kingbright_APFA3010_3x1.5mm_Horizontal; Value: RGB
footprint LED_Kingbright_APFA3010_3x1.5mm_Horizontal
pins: 1 R, 2 A, 3 G, 4 B

## NMOS DMN62D0UW
designator Q1003_?, comment DMN62D0UW
HOUSE PART NUMBER: DMN62D0UW-7; MANUFACTURER: Diodes; VDSS: 60V; Substitutions Policy: ECO Required for Substitution; SUPPLIER 1: Mouser; SUPPLIER PART NUMBER 1: 621-DMN62D0UW-7; MANUFACTURER PART NUMBER: DMN62D0UW-7; PACKAGE: SOT-323; Footprint: Thunderscope_Rev5:GEN_SOT_323; Value: DMN62D0UW
footprint GEN_SOT_323
pins: 1 D, 2 G, 3 S

## OSC 10MHz ECS-TXO-3225MV
designator Y?, comment 10MHz
MANUFACTURER: ECS International; MANUFACTURER PART NUMBER: ECS-TXO-3225MV-100-TR; Substitutions Policy: ECO Required for Substitution; SUPPLIER 1: Mouser; SUPPLIER PART NUMBER 1: 520-TXO-3225MV-100-T; PACKAGE: 4-SMD (3.2x2.5mm); Footprint: Thunderscope_Rev5:ECS_TXO-3225; Value: 10MHz
footprint ECS_TXO-3225
pins: 1 EN, 2 GND, 3 OUT, 4 VDD

## OSC 25MHz ECS-TXO-2016
designator Y?, comment 25MHz
HOUSE PART NUMBER: ECS-TXO-2016-33-250-TR; MANUFACTURER: ECS International; Substitutions Policy: ECO Required for Substitution; SUPPLIER 1: Mouser; SUPPLIER PART NUMBER 1: 520-TXO-2016-33-250T; MANUFACTURER PART NUMBER: ECS-TXO-2016-33-250-TR; PACKAGE: 4-SMD (2.0x1.6mm); Footprint: Thunderscope_Rev5:ECS_TXO-2016; Value: 25MHz
footprint ECS_TXO-2016
pins: 1 EN, 2 GND, 3 OUT, 4 VDD

## PCIe IO Shield
designator SHLD?, comment 9204
MANUFACTURER: Keystone Electronics; SUPPLIER 1: Mouser; SUPPLIER PART NUMBER 1: 534-9204; MANUFACTURER PART NUMBER: 9204; Value: 9204

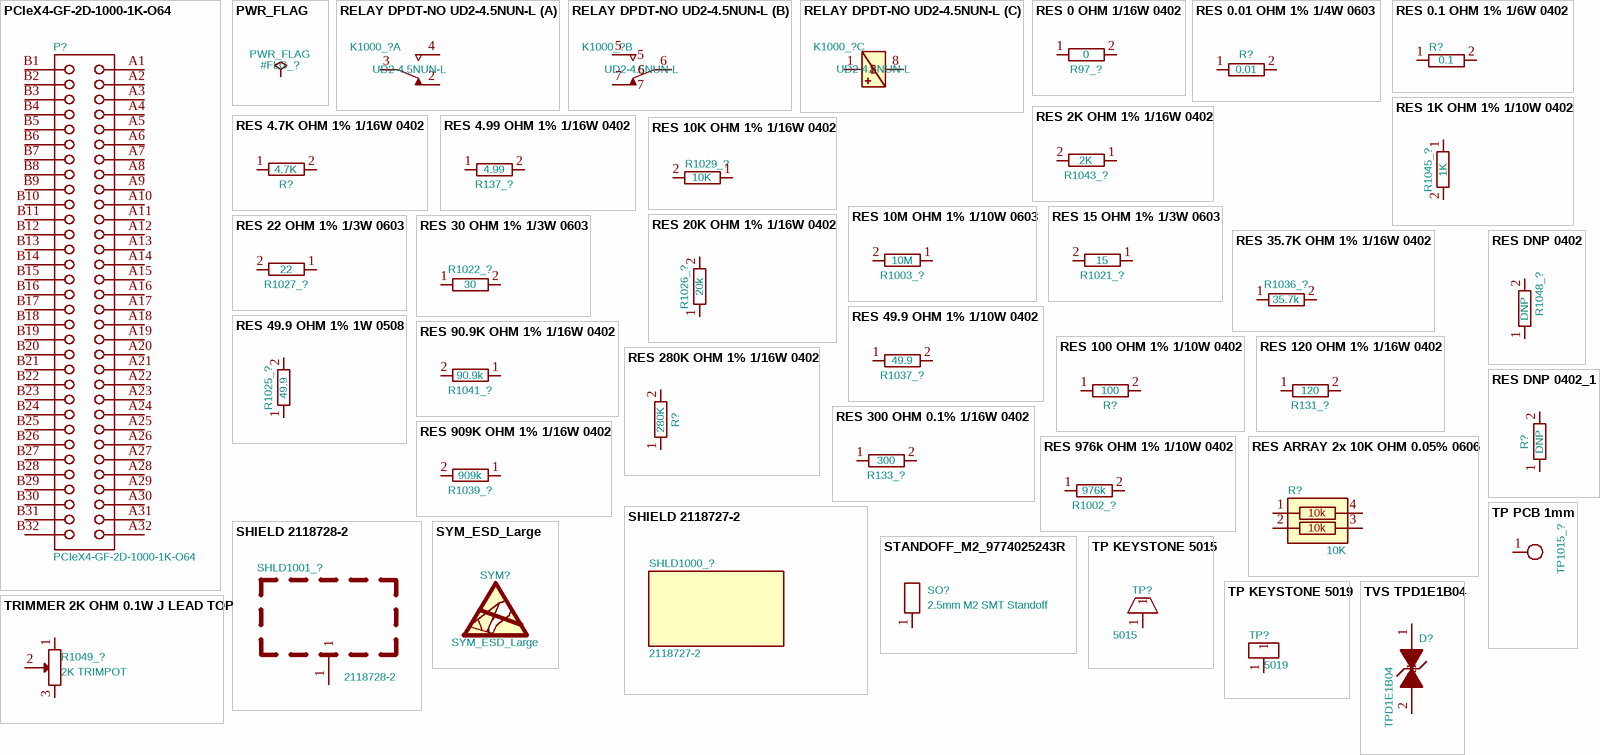
[diagram p3: symbols PCIeX4-GF-2D-1000-1K-O64 to TVS TPD1E1B04]

## PCIeX4-GF-2D-1000-1K-O64
designator P?
MATING CONNECTOR: Molex-87715-9106; DATASHEET VERSION: rev2.0, Apr-2007; PACKAGE REFERENCE: PCIeX4-GF-2D-1000-1K-O64; CLASSNAME: Edge Connector; PUBLISHER: Altium; COMPONENT KIND: Standard (No BOM); Footprint: Thunderscope_Rev5:PCIeX4-GF-2D-1000-1K-O64; Value: PCIeX4-GF-2D-1000-1K-O64
footprint PCIeX4-GF-2D-1000-1K-O64
pins: A1, A2, A3, A4, A5, A6, A7, A8, A9, A10, A11, A12, A13, A14, A15, A16, A17, A18, A19, A20, A21, A22, A23, A24, A25, A26, A27, A28, A29, A30, A31, A32, B1, B2, B3, B4, B5, B6, B7, B8, B9, B10, B11, B12, B13, B14, B15, B16, B17, B18, B19, B20, B21, B22, B23, B24, B25, B26, B27, B28, B29, B30, B31, B32

## PWR_FLAG
designator #FLG_?  (graphical)
Value: PWR_FLAG
pins: 1

## RELAY DPDT-NO UD2-4.5NUN-L
designator K1000_?, comment UD2-4.5NUN-L
MANUFACTURER: KEMET; Substitutions Policy: No Substitutions; MANUFACTURER PART NUMBER: UD2-4.5NUN-L; SUPPLIER 1: Mouser; SUPPLIER PART NUMBER 1: 80-UD2-4.5NUN-L; PACKAGE: Surface Mount; Footprint: Thunderscope_Rev5:KEMET_UD2-4.5NUN-L; Value: UD2-4.5NUN-L
footprint KEMET_UD2-4.5NUN-L
part A pins: 2, 3, 4
part B pins: 5, 6, 7
part C pins: 1, 8

## RES 0 OHM 1/16W 0402
designator R97_?, comment 0
MANUFACTURER: Yageo; MANUFACTURER PART NUMBER: RC0402JR-070RL; Substitutions Policy: Any Parametric Equivalent; PACKAGE: 0402; SUPPLIER 1: Mouser; SUPPLIER PART NUMBER 1: 603-RC0402JR-070RL; Footprint: Thunderscope_Rev5:GEN_R_0402; Value: 0
footprint GEN_R_0402
pins: 1, 2

## RES 0.01 OHM 1% 1/4W 0603
designator R?, comment 0.01
HOUSE PART NUMBER: R-0.01-0603-1%-001; MANUFACTURER: Susumu; MANUFACTURER PART NUMBER: RL0816T-R010-F; TOLERANCE: 1%; Substitutions Policy: Any Parametric Equivalent; SUPPLIER 1: Mouser; SUPPLIER PART NUMBER 1: 754-RL0816T-R010-F; PACKAGE: 0603; Footprint: Thunderscope_Rev5:GEN_R_0603; Value: 0.01
footprint GEN_R_0603
pins: 1, 2

## RES 0.1 OHM 1% 1/6W 0402
designator R?, comment 0.1
MANUFACTURER: Panasonic; MANUFACTURER PART NUMBER: ERJ-2BSFR10X; TOLERANCE: 1%; Substitutions Policy: Any Parametric Equivalent; PACKAGE: 0402; SUPPLIER 1: Mouser; SUPPLIER PART NUMBER 1: 667-ERJ-2BSFR10X; Footprint: Thunderscope_Rev5:GEN_R_0402; Value: 0.1
footprint GEN_R_0402
pins: 1, 2

## RES 1K OHM 1% 1/10W 0402
designator R1045_?, comment 1K
HOUSE PART NUMBER: R-1K-0402-1%-001; MANUFACTURER: Yageo; MANUFACTURER PART NUMBER: RC0402FR-071KL; TOLERANCE: 1%; Substitutions Policy: Any Parametric Equivalent; PACKAGE: 0402; SUPPLIER 1: Mouser; SUPPLIER PART NUMBER 1: 603-RC0402FR-071KL; Footprint: Thunderscope_Rev5:GEN_R_0402; Value: 1K
footprint GEN_R_0402
pins: 1, 2

## RES 2K OHM 1% 1/16W 0402
designator R1043_?, comment 2K
MANUFACTURER: Yageo; MANUFACTURER PART NUMBER: RC0402FR-072KL; TOLERANCE: 1%; Substitutions Policy: Any Parametric Equivalent; PACKAGE: 0402; SUPPLIER 1: Mouser; SUPPLIER PART NUMBER 1: 603-RC0402FR-072KL; Footprint: Thunderscope_Rev5:GEN_R_0402; Value: 2K
footprint GEN_R_0402
pins: 1, 2

## RES 4.7K OHM 1% 1/16W 0402
designator R?, comment 4.7K
MANUFACTURER: Yageo; MANUFACTURER PART NUMBER: RC0402FR-074K7L; TOLERANCE: 1%; Substitutions Policy: Any Parametric Equivalent; PACKAGE: 0402; SUPPLIER 1: Mouser; SUPPLIER PART NUMBER 1: 603-RC0402FR-074K7L; Footprint: Thunderscope_Rev5:GEN_R_0402; Value: 4.7K
footprint GEN_R_0402
pins: 1, 2

## RES 4.99 OHM 1% 1/16W 0402
designator R137_?, comment 4.99
MANUFACTURER: Yageo; MANUFACTURER PART NUMBER: RC0402FR-074R99L; TOLERANCE: 1%; Substitutions Policy: Any Parametric Equivalent; PACKAGE: 0402; SUPPLIER 1: Mouser; SUPPLIER PART NUMBER 1: 603-RC0402FR-074R99L; Footprint: Thunderscope_Rev5:GEN_R_0402; Value: 4.99
footprint GEN_R_0402
pins: 1, 2

## RES 10K OHM 1% 1/16W 0402
designator R1029_?, comment 10K
MANUFACTURER: Yageo; MANUFACTURER PART NUMBER: RC0402FR-0710KL; TOLERANCE: 1%; Substitutions Policy: Any Parametric Equivalent; PACKAGE: 0402; SUPPLIER 1: Mouser; SUPPLIER PART NUMBER 1: 603-RC0402FR-0710KL; Footprint: Thunderscope_Rev5:GEN_R_0402; Value: 10K
footprint GEN_R_0402
pins: 1, 2

## RES 10M OHM 1% 1/10W 0603
designator R1003_?, comment 10M
MANUFACTURER: KOA Speer; MANUFACTURER PART NUMBER: RK73H1JTTD1005F; TOLERANCE: 1%; Substitutions Policy: No Substitutions; PACKAGE: 0603; SUPPLIER 1: Mouser; SUPPLIER PART NUMBER 1: 660-RK73H1JTTD1005F; Footprint: Thunderscope_Rev5:GEN_R_0603; Value: 10M
footprint GEN_R_0603
pins: 1, 2

## RES 15 OHM 1% 1/3W 0603
designator R1021_?, comment 15
MANUFACTURER: KOA Speer; MANUFACTURER PART NUMBER: SG73P1JTTD15R0F; TOLERANCE: 1%; Substitutions Policy: No Substitutions; PACKAGE: 0603; SUPPLIER 1: Mouser; SUPPLIER PART NUMBER 1: 660-SG73P1JTTD15R0F; Footprint: Thunderscope_Rev5:GEN_R_0603; Value: 15
footprint GEN_R_0603
pins: 1, 2

## RES 20K OHM 1% 1/16W 0402
designator R1026_?, comment 20k
MANUFACTURER: Yageo; MANUFACTURER PART NUMBER: RC0402FR-0720KL; TOLERANCE: 1%; Substitutions Policy: Any Parametric Equivalent; PACKAGE: 0402; SUPPLIER 1: Mouser; SUPPLIER PART NUMBER 1: 603-RC0402FR-0720KL; Footprint: Thunderscope_Rev5:GEN_R_0402; Value: 20k
footprint GEN_R_0402
pins: 1, 2

## RES 22 OHM 1% 1/3W 0603
designator R1027_?, comment 22
MANUFACTURER: KOA Speer; MANUFACTURER PART NUMBER: SG73P1JTTD22R0F; TOLERANCE: 1%; Substitutions Policy: No Substitutions; PACKAGE: 0603; SUPPLIER 1: Mouser; SUPPLIER PART NUMBER 1: 660-SG73P1JTTD22R0F; Footprint: Thunderscope_Rev5:GEN_R_0603; Value: 22
footprint GEN_R_0603
pins: 1, 2

## RES 30 OHM 1% 1/3W 0603
designator R1022_?, comment 30
MANUFACTURER: KOA Speer; MANUFACTURER PART NUMBER: SG73P1JTTD30R0F; TOLERANCE: 1%; Substitutions Policy: No Substitutions; PACKAGE: 0603; SUPPLIER 1: Mouser; SUPPLIER PART NUMBER 1: 660-SG73P1JTTD30R0F; Footprint: Thunderscope_Rev5:GEN_R_0603; Value: 30
footprint GEN_R_0603
pins: 1, 2

## RES 35.7K OHM 1% 1/16W 0402
designator R1036_?, comment 35.7k
MANUFACTURER: Yageo; MANUFACTURER PART NUMBER: RC0402FR-0735K7L; TOLERANCE: 1%; Substitutions Policy: Any Parametric Equivalent; PACKAGE: 0402; SUPPLIER 1: Mouser; SUPPLIER PART NUMBER 1: 603-RC0402FR-0735K7L; Footprint: Thunderscope_Rev5:GEN_R_0402; Value: 35.7k
footprint GEN_R_0402
pins: 1, 2

## RES 49.9 OHM 1% 1/10W 0402
designator R1037_?, comment 49.9
MANUFACTURER: Yageo; MANUFACTURER PART NUMBER: RC0402FR-0749R9L; TOLERANCE: 1%; Substitutions Policy: Any Parametric Equivalent; PACKAGE: 0402; SUPPLIER 1: Mouser; SUPPLIER PART NUMBER 1: 603-RC0402FR-0749R9L; Footprint: Thunderscope_Rev5:GEN_R_0402; Value: 49.9
footprint GEN_R_0402
pins: 1, 2

## RES 49.9 OHM 1% 1W 0508
designator R1025_?, comment 49.9
MANUFACTURER: KOA Speer; MANUFACTURER PART NUMBER: WK73R2ATTD49R9F; TOLERANCE: 1%; POWER RATING: 1W; Substitutions Policy: No Substitutions; PACKAGE: 0508; SUPPLIER 1: Mouser; SUPPLIER PART NUMBER 1: 660-WK73R2ATTD49R9F; Footprint: Thunderscope_Rev5:GEN_R_0508; Value: 49.9
footprint GEN_R_0508
pins: 1, 2

## RES 90.9K OHM 1% 1/16W 0402
designator R1041_?, comment 90.9k
MANUFACTURER: Yageo; MANUFACTURER PART NUMBER: RC0402FR-0790K9L; TOLERANCE: 1%; Substitutions Policy: Any Parametric Equivalent; PACKAGE: 0402; SUPPLIER 1: Mouser; SUPPLIER PART NUMBER 1: 603-RC0402FR-0790K9L; Footprint: Thunderscope_Rev5:GEN_R_0402; Value: 90.9k
footprint GEN_R_0402
pins: 1, 2

## RES 100 OHM 1% 1/10W 0402
designator R?, comment 100
MANUFACTURER: Yageo; MANUFACTURER PART NUMBER: RC0402FR-07100RL; TOLERANCE: 1%; Substitutions Policy: Any Parametric Equivalent; PACKAGE: 0402; SUPPLIER 1: Mouser; SUPPLIER PART NUMBER 1: 603-RC0402FR-07100RL; Footprint: Thunderscope_Rev5:GEN_R_0402; Value: 100
footprint GEN_R_0402
pins: 1, 2

## RES 120 OHM 1% 1/16W 0402
designator R131_?, comment 120
MANUFACTURER: Yageo; MANUFACTURER PART NUMBER: RC0402FR-07120RL; TOLERANCE: 1%; Substitutions Policy: Any Parametric Equivalent; PACKAGE: 0402; SUPPLIER 1: Mouser; SUPPLIER PART NUMBER 1: 603-RC0402FR-07120RL; Footprint: Thunderscope_Rev5:GEN_R_0402; Value: 120
footprint GEN_R_0402
pins: 1, 2

## RES 280K OHM 1% 1/16W 0402
designator R?, comment 280K
MANUFACTURER: Yageo; MANUFACTURER PART NUMBER: RC0402FR-07280KL; TOLERANCE: 1%; Substitutions Policy: Any Parametric Equivalent; PACKAGE: 0402; SUPPLIER 1: Mouser; SUPPLIER PART NUMBER 1: 603-RC0402FR-07280KL; Footprint: Thunderscope_Rev5:GEN_R_0402; Value: 280K
footprint GEN_R_0402
pins: 1, 2

## RES 300 OHM 0.1% 1/16W 0402
designator R133_?, comment 300
MANUFACTURER: Panasonic; MANUFACTURER PART NUMBER: ERA-2AEB301X; TOLERANCE: 0.1%; Substitutions Policy: ECO Required for Substitution; PACKAGE: 0402; SUPPLIER 1: Mouser; SUPPLIER PART NUMBER 1: 667-ERA-2AEB301X; Footprint: Thunderscope_Rev5:GEN_R_0402; Value: 300
footprint GEN_R_0402
pins: 1, 2

## RES 909K OHM 1% 1/16W 0402
designator R1039_?, comment 909k
MANUFACTURER: Yageo; MANUFACTURER PART NUMBER: RC0402FR-07909KL; TOLERANCE: 1%; Substitutions Policy: Any Parametric Equivalent; PACKAGE: 0402; SUPPLIER 1: Mouser; SUPPLIER PART NUMBER 1: 603-RC0402FR-07909KL; Footprint: Thunderscope_Rev5:GEN_R_0402; Value: 909k
footprint GEN_R_0402
pins: 1, 2

## RES 976k OHM 1% 1/10W 0402
designator R1002_?, comment 976k
MANUFACTURER: KOA Speer; MANUFACTURER PART NUMBER: RK73H1ETTP9763F; TOLERANCE: 1%; Substitutions Policy: ECO Required for Substitution; PACKAGE: 0402; SUPPLIER 1: Mouser; SUPPLIER PART NUMBER 1: 660-RK73H1ETTP9763F; Footprint: Thunderscope_Rev5:GEN_R_0402; Value: 976k
footprint GEN_R_0402
pins: 1, 2

## RES ARRAY 2x 10K OHM 0.05% 0606
designator R?, comment 10K
MANUFACTURER: Vishay Beyschlag; MANUFACTURER PART NUMBER: ACASN1002S1002P1ATF1002X; TOLERANCE: 1%; Substitutions Policy: No Substitutions; PACKAGE: 0606; SUPPLIER 1: Mouser; SUPPLIER PART NUMBER 1: 594-ACASN1002S1002AT; Footprint: Thunderscope_Rev5:GEN_R_2ARRAY_0606; Value: 10K
footprint GEN_R_2ARRAY_0606
pins: 1, 2, 3, 4
text: 10k

## RES DNP 0402
designator R1048_?, comment DNP
TOLERANCE: 1%; PACKAGE: 0402; Footprint: Thunderscope_Rev5:GEN_R_0402; Value: DNP
footprint GEN_R_0402
pins: 1, 2

## RES DNP 0402_1
designator R?, comment DNP
MANUFACTURER: Yageo; MANUFACTURER PART NUMBER: RC0402FR-07100RL; TOLERANCE: 1%; PACKAGE: 0402; SUPPLIER 1: Mouser; SUPPLIER PART NUMBER 1: 603-RC0402FR-07100RL; Footprint: Thunderscope_Rev5:GEN_R_0402; Value: DNP
footprint GEN_R_0402
pins: 1, 2

## SHIELD 2118727-2
designator SHLD1000_?, comment 2118727-2
MANUFACTURER: TE Connectivity AMP; SUPPLIER 1: Mouser; SUPPLIER PART NUMBER 1: 571-2118727-2; MANUFACTURER PART NUMBER: 2118727-2; Value: 2118727-2

## SHIELD 2118728-2
designator SHLD1001_?, comment 2118728-2
MANUFACTURER: TE Connectivity; Substitutions Policy: No Substitutions; SUPPLIER 1: Mouser; SUPPLIER PART NUMBER 1: 571-2118728-2; MANUFACTURER PART NUMBER: 2118728-2; PACKAGE: Surface Mount; Footprint: Thunderscope_Rev5:TE_2118728-2; Value: 2118728-2
footprint TE_2118728-2
pins: 1

## STANDOFF_M2_9774025243R
designator SO?, comment 2.5mm M2 SMT Standoff
MANUFACTURER: Wurth Elektronik; MANUFACTURER PART NUMBER: 9774025243R; Substitutions Policy: No Substitutions; SUPPLIER 1: Mouser; SUPPLIER PART NUMBER 1: 710-9774025243R; PACKAGE: Surface Mount; Footprint: Thunderscope_Rev5:STANDOFF_M2_9774025243R; Value: 2.5mm M2 SMT Standoff
footprint STANDOFF_M2_9774025243R
pins: 1

## SYM_ESD_Large
designator SYM?
Footprint: Symbol:ESD-Logo_6.6x6mm_SilkScreen; Value: SYM_ESD_Large
footprint ESD-Logo_6.6x6mm_SilkScreen

## TP KEYSTONE 5015
designator TP?, comment 5015
MANUFACTURER: Keystone Electronics; SUPPLIER 1: Mouser; SUPPLIER PART NUMBER 1: 534-5015; MANUFACTURER PART NUMBER: 5015; Footprint: Thunderscope_Rev5:KEY_5015; Value: 5015
footprint KEY_5015
pins: 1

## TP KEYSTONE 5019
designator TP?, comment 5019
MANUFACTURER: Keystone Electronics; SUPPLIER 1: Mouser; SUPPLIER PART NUMBER 1: 534-5019; MANUFACTURER PART NUMBER: 5019; Footprint: Thunderscope_Rev5:KEY_5019; Value: 5019
footprint KEY_5019
pins: 1

## TP PCB 1mm
designator TP1015_?, comment PCB  (value not drawn)
Footprint: Thunderscope_Rev5:GEN_TP_PCB; Value: PCB
footprint GEN_TP_PCB
pins: 1

## TRIMMER 2K OHM 0.1W J LEAD TOP
designator R1049_?, comment 2K TRIMPOT
MANUFACTURER: Bourns; MANUFACTURER PART NUMBER: TC33X-2-202E; TOLERANCE: 1%; Substitutions Policy: ECO Required for Substitution; SUPPLIER 1: Mouser; SUPPLIER PART NUMBER 1: 652-TC33X-2-202E; PACKAGE: 2-SMD (3.8x3.6mm); Footprint: Thunderscope_Rev5:BOU_3mm_POT; Value: 2K TRIMPOT
footprint BOU_3mm_POT
pins: 1, 2, 3

## TVS TPD1E1B04
designator D?, comment TPD1E1B04
MANUFACTURER: Texas Instruments; MANUFACTURER PART NUMBER: TPD1E1B04DPYR; Substitutions Policy: No Substitutions; SUPPLIER 1: Texas Instruments; SUPPLIER PART NUMBER 1: TPD1E1B04DPYR; PACKAGE: 2-X1SON (1x0.6mm); Footprint: Thunderscope_Rev5:TI_X1SON_DPY0002A; Value: TPD1E1B04
footprint TI_X1SON_DPY0002A
pins: 1 K, 2 A

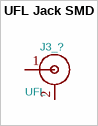
[diagram p4: symbol UFL Jack SMD]

## UFL Jack SMD
designator J3_?, comment UFL
MANUFACTURER: TE Connectivity; MANUFACTURER PART NUMBER: 2334884-1; SUPPLIER 1: Mouser; SUPPLIER PART NUMBER 1: 571-2334884-1; PACKAGE: Surface Mount; Footprint: Thunderscope_Rev5:TE_2334884-1; Value: UFL
footprint TE_2334884-1
pins: 1 Signal, 2 SHIELD